# Altium schematic symbol library Gateway_Academic.SchLib: 77 symbols (part 2 of 2)
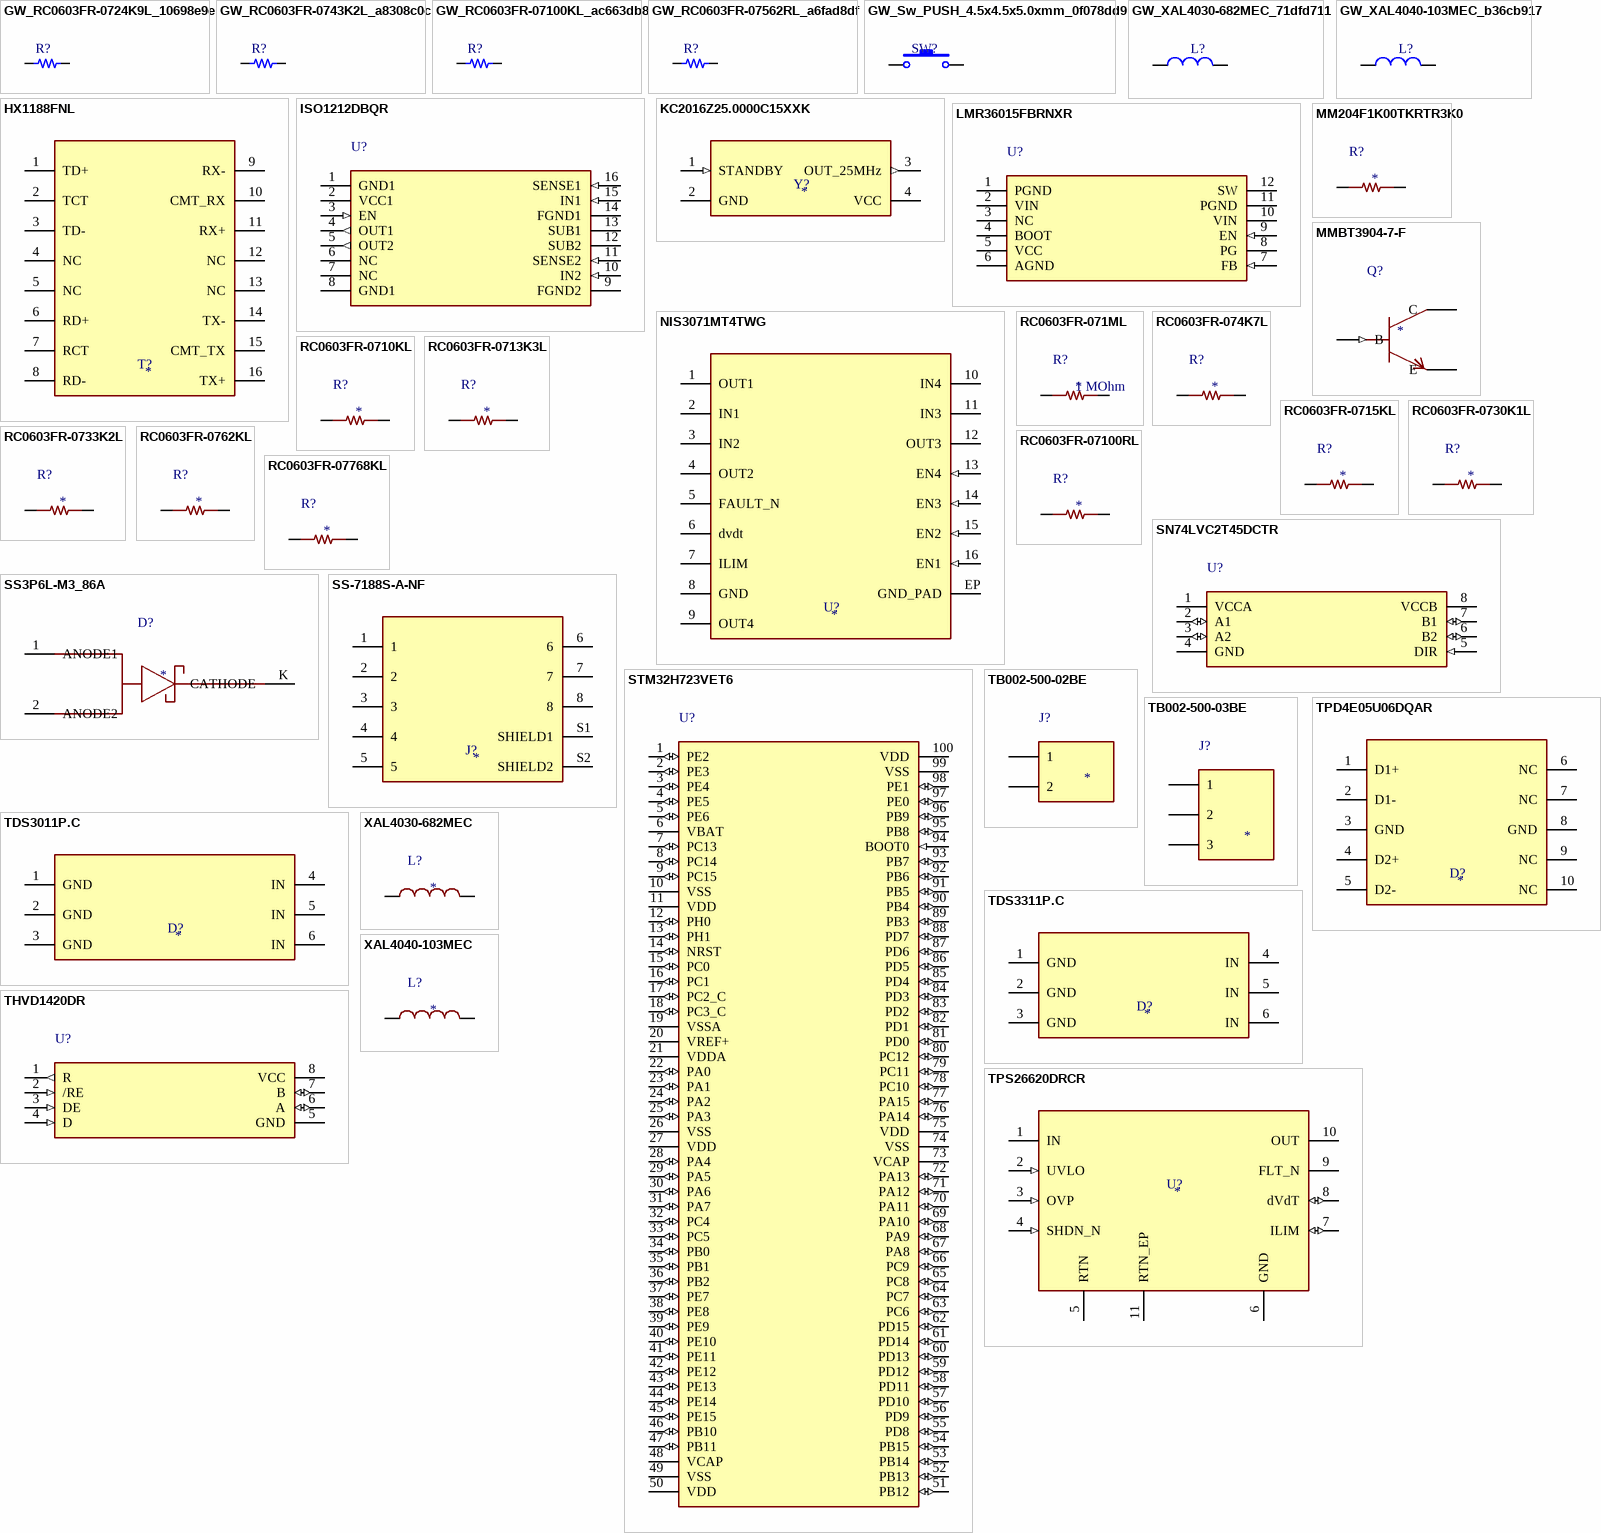
[diagram p2: symbols GW_RC0603FR-0724K9L_10698e9e to XAL4040-103MEC]

## RC0603FR-0733K2L
designator R?
33.2kOhm1%0.1W75V; Exact Yageo spec; manufacturer Mounting2018p4Fig4/Table1; Manufacturer Part Number: RC0603FR-0733K2L; Design Approval: PROPOSED_APPLICATION_VALUE; CAD Status: CAD_VERIFIED; Electrical Test: NOT_TESTED; Manufacturer: Yageo; Value: 33.2kOhm1%0.1W75V; Source: Exact Yageo spec; manufacturer Mounting2018p4Fig4/Table1; Datasheet: https://yageogroup.com/download/specsheet/RC0603FR-0733K2L
footprint GW_RC0603_YAGEO_REFLOW
pins: 1, 2

## RC0603FR-0762KL
designator R?
Yageo Mounting13-Feb-2018 V10 p4 Fig4/Table1; exact62k/15k manufacturer spec sheets; 62.0kOhm1%0.1W75V;; Manufacturer Part Number: RC0603FR-0762KL; Design Approval: PROTOTYPE_APPROVED; Electrical Test: NOT_TESTED; CAD Status: CAD_VERIFIED; Limitations: None; Manufacturer: Yageo; Value: 62.0kOhm1%0.1W75V; Source: Yageo Mounting13-Feb-2018 V10 p4 Fig4/Table1; exact62k/15k manufacturer spec sheets
footprint GW_RC0603_YAGEO_REFLOW
pins: 1, 2

## RC0603FR-07100RL
designator R?
RC0603FR-07100RL;1%0.1W75V0603; manufacturer RCseries ordering;Yageo mounting13Feb2018V10p4; Value: 100 Ohm; CAD Status: CAD_VERIFIED_GEOMETRY;NATIVE_PLACEMENT_PENDING; Electrical Status: DERIVED_PENDING_REVIEW;ORDER_CODE_FAMILY_SUPPORTED;EXACT_NOMINAL_SHEET_PENDING; Tolerance: 1%; Voltage Rating: 75V or sqrt(P*R),whichever lower; Power Rating: 0.1W at70C; Manufacturer: Yageo; Manufacturer Part Number: RC0603FR-07100RL; Source: Yageo RC0603 series order coding; Mounting13Feb2018V10 p4 Fig4/Table1; Package: 0603
footprint GW_RC0603_YAGEO_REFLOW
pins: 1, 2

## RC0603FR-07768KL
designator R?
768kOhm1%0.1W75V; Exact Yageo spec; manufacturer Mounting2018p4Fig4/Table1; Manufacturer Part Number: RC0603FR-07768KL; Design Approval: PROPOSED_APPLICATION_VALUE; CAD Status: CAD_VERIFIED; Electrical Test: NOT_TESTED; Manufacturer: Yageo; Value: 768kOhm1%0.1W75V; Source: Exact Yageo spec; manufacturer Mounting2018p4Fig4/Table1; Datasheet: https://yageogroup.com/download/specsheet/RC0603FR-07768KL
footprint GW_RC0603_YAGEO_REFLOW
pins: 1, 2

## SN74LVC2T45DCTR
designator U?  (value not drawn)
SN74LVC2T45DCTR; CAD_CANDIDATE; Electrical candidate only; no OE pin. VOH at BSP75N input load remains open.; Manufacturer: Texas Instruments; Electrical_Status: PROVISIONAL; CAD_Source: SCES516N table4-1 p2; DCT0008A 4220784/D PDF pp28-30; Manufacturer Part Number: SN74LVC2T45DCTR; Value: SN74LVC2T45DCTR; CAD_Status: CAD_CANDIDATE; CAD_Limitations: Electrical candidate only; no OE pin. VOH at BSP75N input load remains open.
footprint GW_DCT0008A_TI
pins: 1 VCCA (power), 2 A1 (io), 3 A2 (io), 4 GND (power), 5 DIR (in), 6 B2 (io), 7 B1 (io), 8 VCCB (power)

## SS3P6L-M3_86A
designator D?
User-approved series reverse diode:manufacturer1/2 anodes,K large cathode. Same model also reserved DNP output clamp; do not populateSOUT withoutVF review. No hot reverse while charged.; Manufacturer: Vishay; Manufacturer Part Number: SS3P6L-M3/86A; CAD Status: CAD_VERIFIED; Electrical Approval: PROTOTYPE_APPROVED; Electrical Test: NOT_TESTED; Source: Vishay88987 Rev24-Apr-2020 pp1,4; numbered anodes1/2, cathodeK; minimum mounting lands; Datasheet: sources/SS3P6L_88987.pdf; Limitations: User-approved series reverse diode:manufacturer1/2 anodes,K large cathode. Same model also reserved DNP output clamp; do not populateSOUT withoutVF review. No hot reverse while charged.; Design Approval: PROTOTYPE_APPROVED
footprint GW_SS3P6L_VISHAY_88987
pins: 1 ANODE1, 2 ANODE2, K CATHODE

## SS-7188S-A-NF
designator J?
SS-7188S-A-NF; CAD_VERIFIED_GEOMETRY; All8numberedholes,2shieldPTH,2mountNPTHandcomponent-sideorientationverified;chosen3.20mmNPHwithin3.175..3.2512drawingrange. Copperannuliareprototypechoices. Checkhousing16.13x21.59mmmax/boardedgeprojectionandTHassemblymanually;no3D/courtyardclaim.; Manufacturer: Cinch / Stewart; CAD Status: CAD_VERIFIED_GEOMETRY;NATIVE_ECO_PENDING; Manufacturer Part Number: SS-7188S-A-NF; Source: Stewart CT710001RevB0component-sidePCBholelayout;signals.035inch,shield.062inch,mount.125-.128inch;pin1lowerstaggeredrow; Limitations: All8numberedholes,2shieldPTH,2mountNPTHandcomponent-sideorientationverified;chosen3.20mmNPHwithin3.175..3.2512drawingrange. Copperannuliareprototypechoices. Checkhousing16.13x21.59mmmax/boardedgeprojectionandTHassemblymanually;no3D/courtyardclaim.
footprint GW_SS7188SANF_STEWART
pins: 1, 2, 3, 4, 5, 6, 7, 8, S1 SHIELD1, S2 SHIELD2

## STM32H723VET6
designator U?  (value not drawn)
STM32H723VET6; CAD_VERIFIED_GEOMETRY; GPIOs use bidirectional ERC type; oscillator pins have dedicated types. VCAP power pins are LDO outputs, never connect to VDD.; ST fig65 lands and all100 pad IDs verified2026-11-08. GPIO ERC types conservative;VCAP neverVDD. Native placement/ECO pending.; Manufacturer: STMicroelectronics; CAD_Status: CAD_VERIFIED_GEOMETRY;NATIVE_ECO_PENDING; Electrical_Status: PROVISIONAL; CAD_Source: DS13313 Rev5 fig5, table7 pp57-71, fig65 p218 (PDF p219); Manufacturer Part Number: STM32H723VET6; Value: STM32H723VET6; CAD_Limitations: ST fig65 lands and all100 pad IDs verified2026-11-08. GPIO ERC types conservative;VCAP neverVDD. Native placement/ECO pending.
footprint GW_LQFP100_ST_1L
pins: 1 PE2 (io), 2 PE3 (io), 3 PE4 (io), 4 PE5 (io), 5 PE6 (io), 6 VBAT (power), 7 PC13 (io), 8 PC14 (io), 9 PC15 (io), 10 VSS (power), 11 VDD (power), 12 PH0 (io), 13 PH1 (io), 14 NRST (io), 15 PC0 (io), 16 PC1 (io), 17 PC2_C (io), 18 PC3_C (io), 19 VSSA (power), 20 VREF+ (power), 21 VDDA (power), 22 PA0 (io), 23 PA1 (io), 24 PA2 (io), 25 PA3 (io), 26 VSS (power), 27 VDD (power), 28 PA4 (io), 29 PA5 (io), 30 PA6 (io), 31 PA7 (io), 32 PC4 (io), 33 PC5 (io), 34 PB0 (io), 35 PB1 (io), 36 PB2 (io), 37 PE7 (io), 38 PE8 (io), 39 PE9 (io), 40 PE10 (io), 41 PE11 (io), 42 PE12 (io), 43 PE13 (io), 44 PE14 (io), 45 PE15 (io), 46 PB10 (io), 47 PB11 (io), 48 VCAP (power), 49 VSS (power), 50 VDD (power), 51 PB12 (io), 52 PB13 (io), 53 PB14 (io), 54 PB15 (io), 55 PD8 (io), 56 PD9 (io), 57 PD10 (io), 58 PD11 (io), 59 PD12 (io), 60 PD13 (io), 61 PD14 (io), 62 PD15 (io), 63 PC6 (io), 64 PC7 (io), 65 PC8 (io), 66 PC9 (io), 67 PA8 (io), 68 PA9 (io), 69 PA10 (io), 70 PA11 (io), 71 PA12 (io), 72 PA13 (io), 73 VCAP (power), 74 VSS (power), 75 VDD (power), 76 PA14 (io), 77 PA15 (io), 78 PC10 (io), 79 PC11 (io), 80 PC12 (io), 81 PD0 (io), 82 PD1 (io), 83 PD2 (io), 84 PD3 (io), 85 PD4 (io), 86 PD5 (io), 87 PD6 (io), 88 PD7 (io), 89 PB3 (io), 90 PB4 (io), 91 PB5 (io), 92 PB6 (io), 93 PB7 (io), 94 BOOT0 (in), 95 PB8 (io), 96 PB9 (io), 97 PE0 (io), 98 PE1 (io), 99 VSS (power), 100 VDD (power)

## TB002-500-02BE
designator J?
Same Sky TB002-500 Rev1.04 09/12/2024 p1 order key,p2 PCB layout; project contact1left in PCBtopview with wire entry facing-Y;not manufacturer polarity; Manufacturer: Same Sky (formerly CUI Devices); Manufacturer Part Number: TB002-500-02BE; Value: 2-pole5mm terminal block; CAD Status: CAD_VERIFIED_GEOMETRY;NATIVE_PLACEMENT_PENDING; Electrical Status: DERIVED_PENDING_REVIEW; Physical Mapping: Project-defined1left then+X in PCBtopview; wire-entryfront-Y. Confirm wire polarity against silk before bringup.; Source: Same Sky TB002-500 Rev1.04 09/12/2024 p1 order key,p2 PCB layout; Datasheet: sources/autonomous_closure/tb002-500.pdf
footprint GW_TB002_500_2P_SAMESKY
pins: 1, 2

## TB002-500-03BE
designator J?
Same Sky TB002-500 Rev1.04 09/12/2024 p1 order key,p2 PCB layout; project contact1left in PCBtopview with wire entry facing-Y;not manufacturer polarity; Manufacturer: Same Sky (formerly CUI Devices); Manufacturer Part Number: TB002-500-03BE; Value: 3-pole5mm terminal block; CAD Status: CAD_VERIFIED_GEOMETRY;NATIVE_PLACEMENT_PENDING; Electrical Status: DERIVED_PENDING_REVIEW; Physical Mapping: Project-defined1left then+X in PCBtopview; wire-entryfront-Y. Confirm wire polarity against silk before bringup.; Source: Same Sky TB002-500 Rev1.04 09/12/2024 p1 order key,p2 PCB layout; Datasheet: sources/autonomous_closure/tb002-500.pdf
footprint GW_TB002_500_3P_SAMESKY
pins: 1, 2, 3

## TDS3011P.C
designator D?
Semtech TDS3011P Rev2.0 16-Jun-2021 pp5-7; p6 reference land pattern; All six pins must connect. 30V working limit; source tolerance, hot leakage and transient coordination not approved. Manufacturer reference copper; mask/paste DFM pending.; Manufacturer Part Number: TDS3011P.C; CAD Status: CAD_CANDIDATE; Electrical Approval: PROPOSED_FOR_REUSE; Manufacturer: Semtech; Source: Semtech TDS3011P Rev2.0 16-Jun-2021 pp5-7; p6 reference land pattern; Datasheet: sources/input_protection/TDS3011P.pdf; Limitations: All six pins must connect. 30V working limit; source tolerance, hot leakage and transient coordination not approved. Manufacturer reference copper; mask/paste DFM pending.
footprint GW_TDS3011P_SEMTECH
pins: 1 GND, 2 GND, 3 GND, 4 IN, 5 IN, 6 IN

## TDS3311P.C
designator D?
Semtech TDS3311P Rev2.4 pp2,7-9; official product portal confirms33V orderTDS3311P.C; 33V working;42Vmax specified35A pulse;; Design Approval: PROTOTYPE_APPROVED; Electrical Test: NOT_TESTED; CAD Status: CAD_VERIFIED; Limitations: None; Manufacturer: Semtech; Manufacturer Part Number: TDS3311P.C; Value: 33V working;42Vmax specified35A pulse; Source: Semtech TDS3311P Rev2.4 pp2,7-9; official product portal confirms33V orderTDS3311P.C
footprint GW_TDS3311P_SEMTECH
pins: 1 GND, 2 GND, 3 GND, 4 IN, 5 IN, 6 IN

## THVD1420DR
designator U?  (value not drawn)
THVD1420DR; CAD_VERIFIED_GEOMETRY; Exact8pinmap andTIlanddimensionsverified. Altium17%half-side givesR0.051mm vs0.05typ. Sharedlanddimensions alsoindependently matchMicrochipOA. NativeECO/assemblyreviewpending.; Manufacturer: Texas Instruments; CAD_Status: CAD_VERIFIED_GEOMETRY;NATIVE_ECO_PENDING; Electrical_Status: PROVISIONAL; CAD_Source: TI SLLSF78B D0008A4214825/C PDF31;row5.4,pitch1.27,1.55x.60lands; Manufacturer Part Number: THVD1420DR; Value: THVD1420DR; CAD_Limitations: Exact8pinmap andTIlanddimensionsverified. Altium17%half-side givesR0.051mm vs0.05typ. Sharedlanddimensions alsoindependently matchMicrochipOA. NativeECO/assemblyreviewpending.
footprint GW_SOIC8_1P27_5P4
pins: 1 R (out), 2 /RE (in), 3 DE (in), 4 D (in), 5 GND (power), 6 A (io), 7 B (io), 8 VCC (power)

## TPD4E05U06DQAR
designator D?
TPD4E05U06DQAR; CAD_VERIFIED_GEOMETRY; TI DQA0010A pp29-30;R0.05 usingAltium50% for0.2mm leads and25% for0.4mm GND (percentageofhalfshortside). GNDpaste0.565x0.36mm. ExternalNC-flow-through continuity andnativeECO pending.; Manufacturer: Texas Instruments; CAD Status: CAD_VERIFIED_GEOMETRY;NATIVE_ECO_PENDING; Manufacturer Part Number: TPD4E05U06DQAR; Source: TI SLVSBO7O table4-2 p4; DQA0010A 4220328/A board/stencil pp29-30; Limitations: TI DQA0010A pp29-30;R0.05 usingAltium50% for0.2mm leads and25% for0.4mm GND (percentageofhalfshortside). GNDpaste0.565x0.36mm. ExternalNC-flow-through continuity andnativeECO pending.
footprint GW_DQA0010A_TI
pins: 1 D1+, 2 D1-, 3 GND (power), 4 D2+, 5 D2-, 6 NC, 7 NC, 8 GND (power), 9 NC, 10 NC

## TPS26620DRCR
designator U?
Single-channel60V eFuse; TPS26620 latch-off; RTN != system GND; DRC10+EP11; Manufacturer: Texas Instruments; Manufacturer Part Number: TPS26620DRCR; Local Datasheet: sources/tps26620/tps2662.pdf; CAD Status: CAD_CANDIDATE; Design Approval: APPROVED_COMPONENT_SELECTION; Electrical Test: NOT_TESTED; Critical Connection: Pin5 and EP11 to EF_RTN, NEVER directly to system GND pin6; Fault Response: TPS26620 latch-off, adjustable overvoltage cutoff; not TPS26621 auto-retry; Datasheet: https://www.ti.com/lit/ds/symlink/tps2662.pdf; Source: TI TPS2662 SLVSDT4F Dec2021 Table6-1 p4; DRC0010J4218878/B board p44/stencil p45; Footprint Limitation: Native custom-pad11 extension conversion/net inheritance pending; not PCB-release ready
footprint GW_DRC0010J_TI_TPS2662_EPU
pins: 1 IN (power), 2 UVLO (in), 3 OVP (in), 4 SHDN_N (in), 5 RTN (power), 6 GND (power), 7 ILIM (io), 8 dVdT (io), 9 FLT_N (oc), 10 OUT (power), 11 RTN_EP (power)

## XAL4030-682MEC
designator L?
XAL4030-682MEC; CAD_VERIFIED_GEOMETRY; Savedinchprimarylands.9652x3.4036mm,centres2.3622mmmatchdrawing;metriclabelsarerounded. Nonpolarprojectpin1markedend->SW,pin2->output;4.0mmnominalbody,3.1mmmaxheight. Nativeplacement/thermalacceptancepending.; Manufacturer: Coilcraft; CAD Status: CAD_VERIFIED_GEOMETRY;NATIVE_ECO_PENDING; Manufacturer Part Number: XAL4030-682MEC; Source: Coilcraft806-4Rev25Feb2026p4;landcentres.093inch,width.038inch,height.134inch; Limitations: Savedinchprimarylands.9652x3.4036mm,centres2.3622mmmatchdrawing;metriclabelsarerounded. Nonpolarprojectpin1markedend->SW,pin2->output;4.0mmnominalbody,3.1mmmaxheight. Nativeplacement/thermalacceptancepending.
footprint GW_XAL4030_COILCRAFT
pins: 1, 2

## XAL4040-103MEC
designator L?
XAL4040-103MEC; CAD_VERIFIED_GEOMETRY; Savedinchprimarylands.9652x3.4036mm,centres2.3622mmmatchdrawing. Nonpolarprojectpin1markedend->SW,pin2->output;4.0mmnominalbody,4.1mmmaxheight. Nativeplacement/thermalacceptancepending.; Manufacturer: Coilcraft; CAD Status: CAD_VERIFIED_GEOMETRY;NATIVE_ECO_PENDING; Manufacturer Part Number: XAL4040-103MEC; Source: Coilcraft806-4Rev25Feb2026p4;samerecommendedlandpatternasXAL4030; Limitations: Savedinchprimarylands.9652x3.4036mm,centres2.3622mmmatchdrawing. Nonpolarprojectpin1markedend->SW,pin2->output;4.0mmnominalbody,4.1mmmaxheight. Nativeplacement/thermalacceptancepending.
footprint GW_XAL4040_COILCRAFT
pins: 1, 2